# Altium footprint library Cole_.PcbLib: 167 footprints (part 9 of 11)
Each footprint in its own frame and in the unit in brackets; x right, y up, seen from the top. Pads: shape width x height; smd on the part's side, far side on the other; paste and mask are expansions set on the pad; w line width, h text height; cw(c..) or ccw(c..) is an arc to the next point about the centre after c.
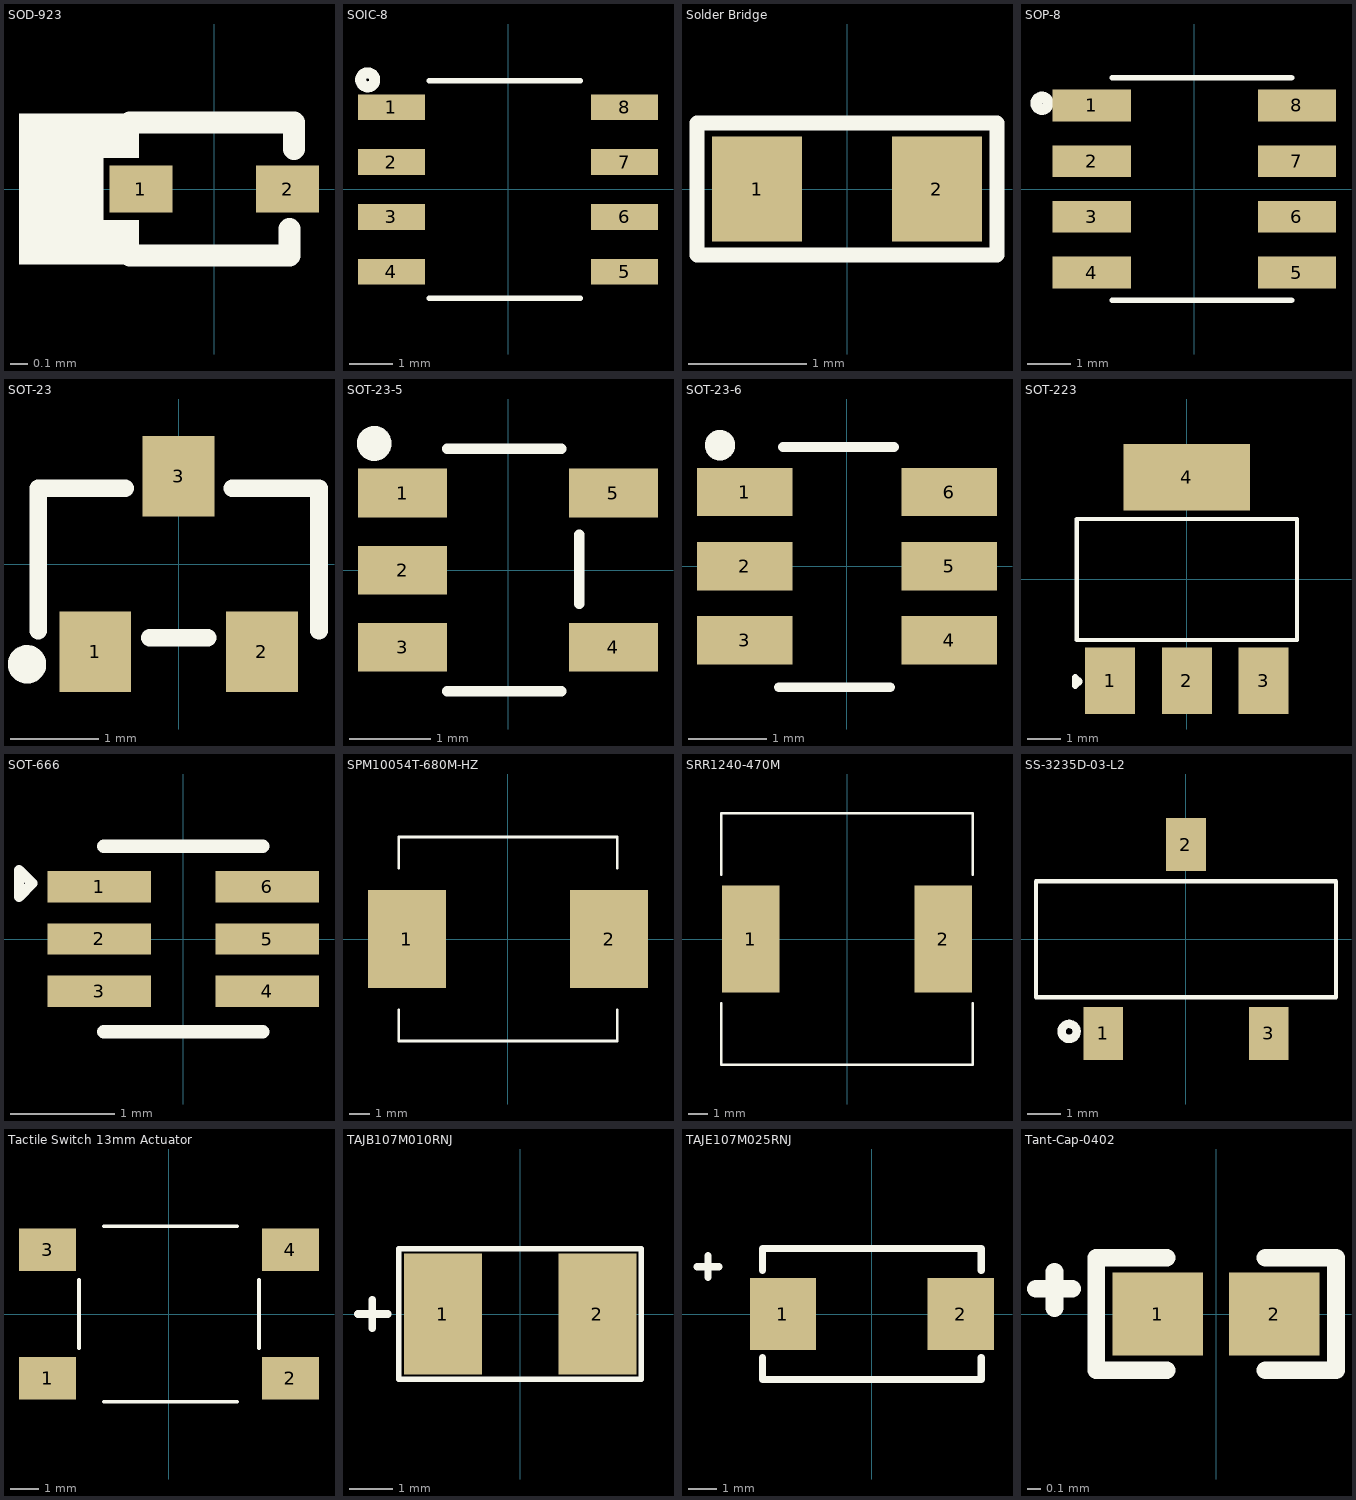
[diagram p8: the footprints below, top view; thin cyan lines are the x and y axes]

## SOD-923 [mm]
pads (2):
  rect 0.36x0.27 smd: 1(-0.42,0) 2(0.42,0)
Top Overlay:
  rectangle: -1.118,0.178 -0.432,0.432
  rectangle: -1.118,-0.432 -0.432,-0.178
  rectangle: -1.118,-0.432 -0.635,0.432
  lines w0.127: -0.483,-0.381 0.432,-0.381 0.432,-0.229 ; -0.483,0.381 0.457,0.381 0.457,0.229
3D body "User Library-DIODE_SOD-923.step": height 0.43, standoff 0, extent -0.525,-0.325 0.525,0.325

## SOIC-8 [mm]
pads (8):
  rect 1.55x0.6 smd: 1(-2.7,1.905) 2(-2.7,0.635) 3(-2.7,-0.635) 4(-2.7,-1.905) 5(2.7,-1.905) 6(2.7,-0.635) 7(2.7,0.635) 8(2.7,1.905)
Top Overlay:
  circle w0.254: c-3.251,2.54 r0.163
  lines w0.127: -1.829,-2.515 1.676,-2.515 ; -1.829,2.515 1.676,2.515
3D body "User Library-SOIC-8-1.STEP": height 1.7, standoff -0.05, extent -3,-2.45 3,2.45

## Solder Bridge [mil] "Solder Bridge ON"
pads (2):
  rect 30x35 smd: 1(-30,0) 2(30,0)
Top Overlay:
  lines w5: -50,-22 50,-22 50,22 -50,22 -50,-22

## SOP-8 [mm]
pads (8):
  rect 1.78x0.72 smd: 1(-2.34,1.905) 2(-2.34,0.635) 3(-2.34,-0.635) 4(-2.34,-1.905) 5(2.34,-1.905) 6(2.34,-0.635) 7(2.34,0.635) 8(2.34,1.905)
Top Overlay:
  circle w0.254: c-3.475,1.956 r0.137
  lines w0.127: -1.874,-2.54 2.215,-2.54 ; -1.874,2.54 2.215,2.54
3D body "SOP-8L_DIO.step": height 1.75, standoff 0, extent -3.125,-2.475 3.125,2.475

## SOT-23 [mm] "TRANS NPN 40V 0.6A SOT23"
pads (3):
  rect 0.82x0.92 smd: 1(-0.95,-1) 2(0.95,-1) 3(0,1)
Top Overlay:
  circle w0.254: c-1.727,-1.143 r0.092
  lines w0.2: -1.6,-0.762 -1.6,0.864 -0.61,0.864 ; -0.33,-0.838 0.33,-0.838 ; 0.61,0.864 1.6,0.864 1.6,-0.762
3D body "CircuitWorks-SOT-23.step": height 1.05, standoff -0.05, extent -1.5,-1.25 1.5,1.25

## SOT-23-5 [mm]
pads (5):
  rect 1.1x0.6 smd: 1(-1.3,0.95) 2(-1.3,0) 3(-1.3,-0.95) 4(1.3,-0.95) 5(1.3,0.95)
Top Overlay:
  circle w0.254: c-1.65,1.562 r0.088
  lines w0.127: -0.748,-1.496 0.66,-1.496 ; -0.748,1.496 0.66,1.496 ; 0.88,-0.418 0.88,0.44
3D body "SN74LV1T34DBVR.STEP": height 1.45, standoff 0, extent -1.4,-1.45 1.4,1.45

## SOT-23-6 [mm] "IC OPAMP GP 1 CIRCUIT SOT23-6"
pads (6):
  rect 1.22x0.62 smd: 1(-1.31,0.95) 2(-1.31,0) 3(-1.31,-0.95) 4(1.31,-0.95) 5(1.31,0) 6(1.31,0.95)
Top Overlay:
  circle w0.254: c-1.626,1.549 r0.068
  lines w0.127: -0.872,-1.549 0.55,-1.549 ; -0.821,1.524 0.601,1.524
3D body "21-0058I_MXM.step": height 1.47, standoff 0.02, extent -1.499,-1.499 1.499,1.499

## SOT-223 [mm]
pads (4):
  rect 1.5x2 smd: 1(-2.3,-3.05) 2(0,-3.05) 3(2.3,-3.05)
  rect 3.8x2 smd: 4(0,3.05)
Top Overlay:
  lines w0.127: -3.302,-1.829 -3.302,1.803 3.302,1.803 3.302,-1.829 -3.302,-1.829
  lines w0.2: -3.353,-3.2 -3.353,-2.946 -3.226,-3.073 -3.353,-3.2
3D body "User Library-SOT-223-1.step": height 1.61, standoff -0.04, extent -3.25,-3.5 3.25,3.5

## SOT-666 [mm]
pads (6):
  rect 0.99x0.3 smd: 1(-0.805,0.5) 2(-0.805,0) 3(-0.805,-0.5) 4(0.805,-0.5) 5(0.805,0) 6(0.805,0.5)
Top Overlay:
  lines w0.1: -1.575,0.406 -1.448,0.533 -1.575,0.66 -1.575,0.406
  lines w0.127: -0.762,-0.889 0.762,-0.889 ; -0.762,0.889 0.762,0.889
3D body "SOT-666_STM.step": height 0.64, standoff 0, extent -0.851,-0.851 0.851,0.851

## SPM10054T-680M-HZ [mm]
pads (2):
  rect 3.8x4.8 smd mask+0.055: 1(-4.95,0) 2(4.95,0)
Top Overlay:
  lines w0.127: -5.35,-3.47 -5.35,-5 0,-5 5.35,-5 5.35,-3.47 ; -5.35,3.47 -5.35,5 0,5 5.35,5 5.35,3.47

## SRR1240-470M [mm]
pads (2):
  rect 2.9x5.4 smd mask+0.055: 1(-4.85,0) 2(4.85,0)
Top Overlay:
  lines w0.127: -6.325,-3.226 -6.325,-6.325 6.325,-6.325 6.325,-3.226 ; -6.325,3.226 -6.325,6.325 6.325,6.325 6.325,3.226
3D body "srr1240.stp": height 4, standoff 0, extent -6.25,-6.25 6.25,6.25

## SS-3235D-03-L2 [mm] "SPDT 50mA @ 12VDC 12V On-On SMD Toggle Switches RoHS"
pads (3):
  rect 1.2x1.6 smd: 1(-2.5,-2.85) 3(2.5,-2.85)
  rect 1.21x1.6 smd: 2(0,2.85)
Top Overlay:
  circle w0.254: c-3.531,-2.794 r0.227
  lines w0.127: -4.532,-1.758 4.536,-1.758 4.536,1.747 -4.532,1.747 -4.532,-1.758
3D body "ss-3235d-03-l2.stp": height 6.4, standoff 0, extent -4.499,-3.45 4.551,3.45

## Tactile Switch 13mm Actuator [mm]
pads (4):
  rect 2x1.5 smd: 1(-4.25,-2.25) 2(4.25,-2.25) 3(-4.25,2.25) 4(4.25,2.25)
Top Overlay:
  lines w0.127: -3.15,-1.194 -3.15,1.194 ; -2.286,-3.073 2.388,-3.073 ; -2.286,3.073 2.388,3.073 ; 3.15,-1.194 3.15,1.194
3D body "switch.stp": height 16.4, standoff -0.1, extent -4.726,-3 4.574,3

## TAJB107M010RNJ [mil]
pads (2):
  rect 70.87x110 smd: 1(-70,0) 2(70,0)
Top Overlay:
  lines w5: -110,-59 -110,59 110,59 110,-59 -110,-59
  lines w7: -147,0 -120,0
  lines w7.01: -134,-13 -134,13
3D body "User Library-AVX_BCASE.step": height 78.35, standoff -1.57, extent -72.84,-57.68 72.84,57.67

## TAJE107M025RNJ [mm] "CAP TANT 100UF 20% 25V 2917"
pads (2):
  rect 2.31x2.52 smd: 1(-3.1,0) 2(3.1,0)
Top Overlay:
  lines w0.254: -6.096,1.651 -5.334,1.651 ; -5.715,1.27 -5.715,2.032 ; -3.81,-1.524 -3.81,-2.286 3.81,-2.286 3.81,-1.524 ; -3.81,1.524 -3.81,2.286 3.81,2.286 3.81,1.524
3D body "TAJE_AVX.step": height 4.37, standoff 0, extent -3.746,-2.248 3.746,2.248

## Tant-Cap-0402 [mm]
pads (2):
  rect 0.65x0.6 smd mask+0.055: 1(-0.42,0) 2(0.42,0)
Top Overlay:
  lines w0.127: -1.297,0.182 -1.036,0.182 ; -1.164,0.044 -1.164,0.305 ; -0.356,-0.406 -0.864,-0.406 -0.864,0.406 -0.356,0.406 ; 0.357,-0.406 0.865,-0.406 0.865,0.406 0.357,0.406
3D body "TCTseriesUcase_step.STEP": height 0.55, standoff 0, extent -0.5,-0.25 0.5,0.25